# Altium footprint library CP2102N-A02-GQFN24_DS15.PcbLib: 1 footprints
Each footprint in its own frame and in the unit in brackets; x right, y up, seen from the top. Pads: shape width x height; smd on the part's side, far side on the other; paste and mask are expansions set on the pad; w line width, h text height; cw(c..) or ccw(c..) is an arc to the next point about the centre after c.
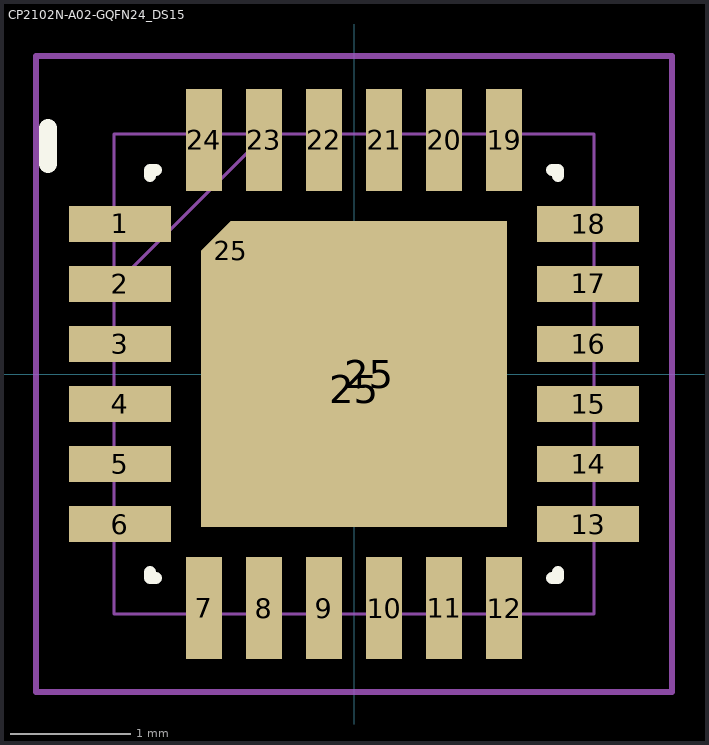
[diagram p0: the footprint, top view; thin cyan lines are the x and y axes]

## CP2102N-A02-GQFN24_DS15 [mm] "User derivative of official UL A01 export; CP2102N-A02 QFN24 datasheet Rev1.5 Fig7.2; EP25 C0.25"
height 0.8
pads (27):
  rect 0.85x0.3 smd paste+0 mask+0.06: 1(-1.95,1.25) 2(-1.95,0.75) 3(-1.95,0.25) 4(-1.95,-0.25) 5(-1.95,-0.75) 6(-1.95,-1.25) 13(1.95,-1.25) 14(1.95,-0.75) 15(1.95,-0.25) 16(1.95,0.25) 17(1.95,0.75) 18(1.95,1.25)
  rect 0.3x0.85 smd paste+0 mask+0.06: 7(-1.25,-1.95) 8(-0.75,-1.95) 9(-0.25,-1.95) 10(0.25,-1.95) 11(0.75,-1.95) 12(1.25,-1.95) 19(1.25,1.95) 20(0.75,1.95) 21(0.25,1.95) 22(-0.25,1.95) 23(-0.75,1.95) 24(-1.25,1.95)
  rect 0.354x0.354 smd rot 45 paste-2 mask+0.06: 25(-1.025,1.025)
  rect 2.55x2.3 smd paste-2 mask+0.06: 25(0,-0.125)
  rect 2.3x2.55 smd paste-2 mask+0.06: 25(0.125,0)
Top Overlay:
  lines w0.1: -1.7,-1.65 -1.7,-1.7 -1.65,-1.7 ; -1.7,1.65 -1.7,1.7 -1.65,1.7 ; 1.65,-1.7 1.7,-1.7 1.7,-1.65 ; 1.65,1.7 1.7,1.7 1.7,1.65
  lines w0.15: -2.55,1.75 -2.55,2.05
  text ".Designator" at -3.492,-0.635 h1.2
Top Paste:
  region: -0.15,1.05 -1.05,1.05 -1.05,0.15 -0.15,0.15
  region: -0.15,-0.15 -1.05,-0.15 -1.05,-1.05 -0.15,-1.05
  region: 1.05,1.05 0.15,1.05 0.15,0.15 1.05,0.15
  region: 1.05,-0.15 0.15,-0.15 0.15,-1.05 1.05,-1.05
Mechanical 13:
  circle w0.025: c-1.879,1.25 r0.076
  lines w0.025: -2,0.73 -0.73,2 ; -2,-2 2,-2 2,2 -2,2 -2,-2
  text ".Designator" at -3.492,-0.635 h1.27
Mechanical 15:
  lines w0.05: -2.65,-2.65 2.65,-2.65 2.65,2.65 -2.65,2.65 -2.65,-2.65
3D body "QFN24_4X4.step": height 0.8, standoff 0, extent -2,-2 2,2